# Altium schematic symbol library Box.SchLib: 2 symbols
Pins are listed as number, name and electrical type; pins without a type are passive.

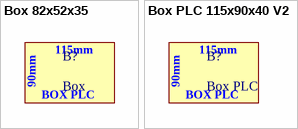
[diagram p0: symbols Box 82x52x35 to Box PLC 115x90x40 V2]

## Box 82x52x35
designator B?, comment Box
footprint BOX 82x52x35
text: 115mm; 90mm; BOX PLC

## Box PLC 115x90x40 V2
designator B?, comment Box PLC
Code: 3802-037
footprint box PLC 115x90x40 V2
text: 115mm; 90mm; BOX PLC